# Altium footprint library WR-TBL_Pluggable Connector_3.81mm.PcbLib: 201 footprints (part 8 of 13)
Each footprint in its own frame and in the unit in brackets; x right, y up, seen from the top. Pads: shape width x height; smd on the part's side, far side on the other; paste and mask are expansions set on the pad; w line width, h text height; cw(c..) or ccw(c..) is an arc to the next point about the centre after c.
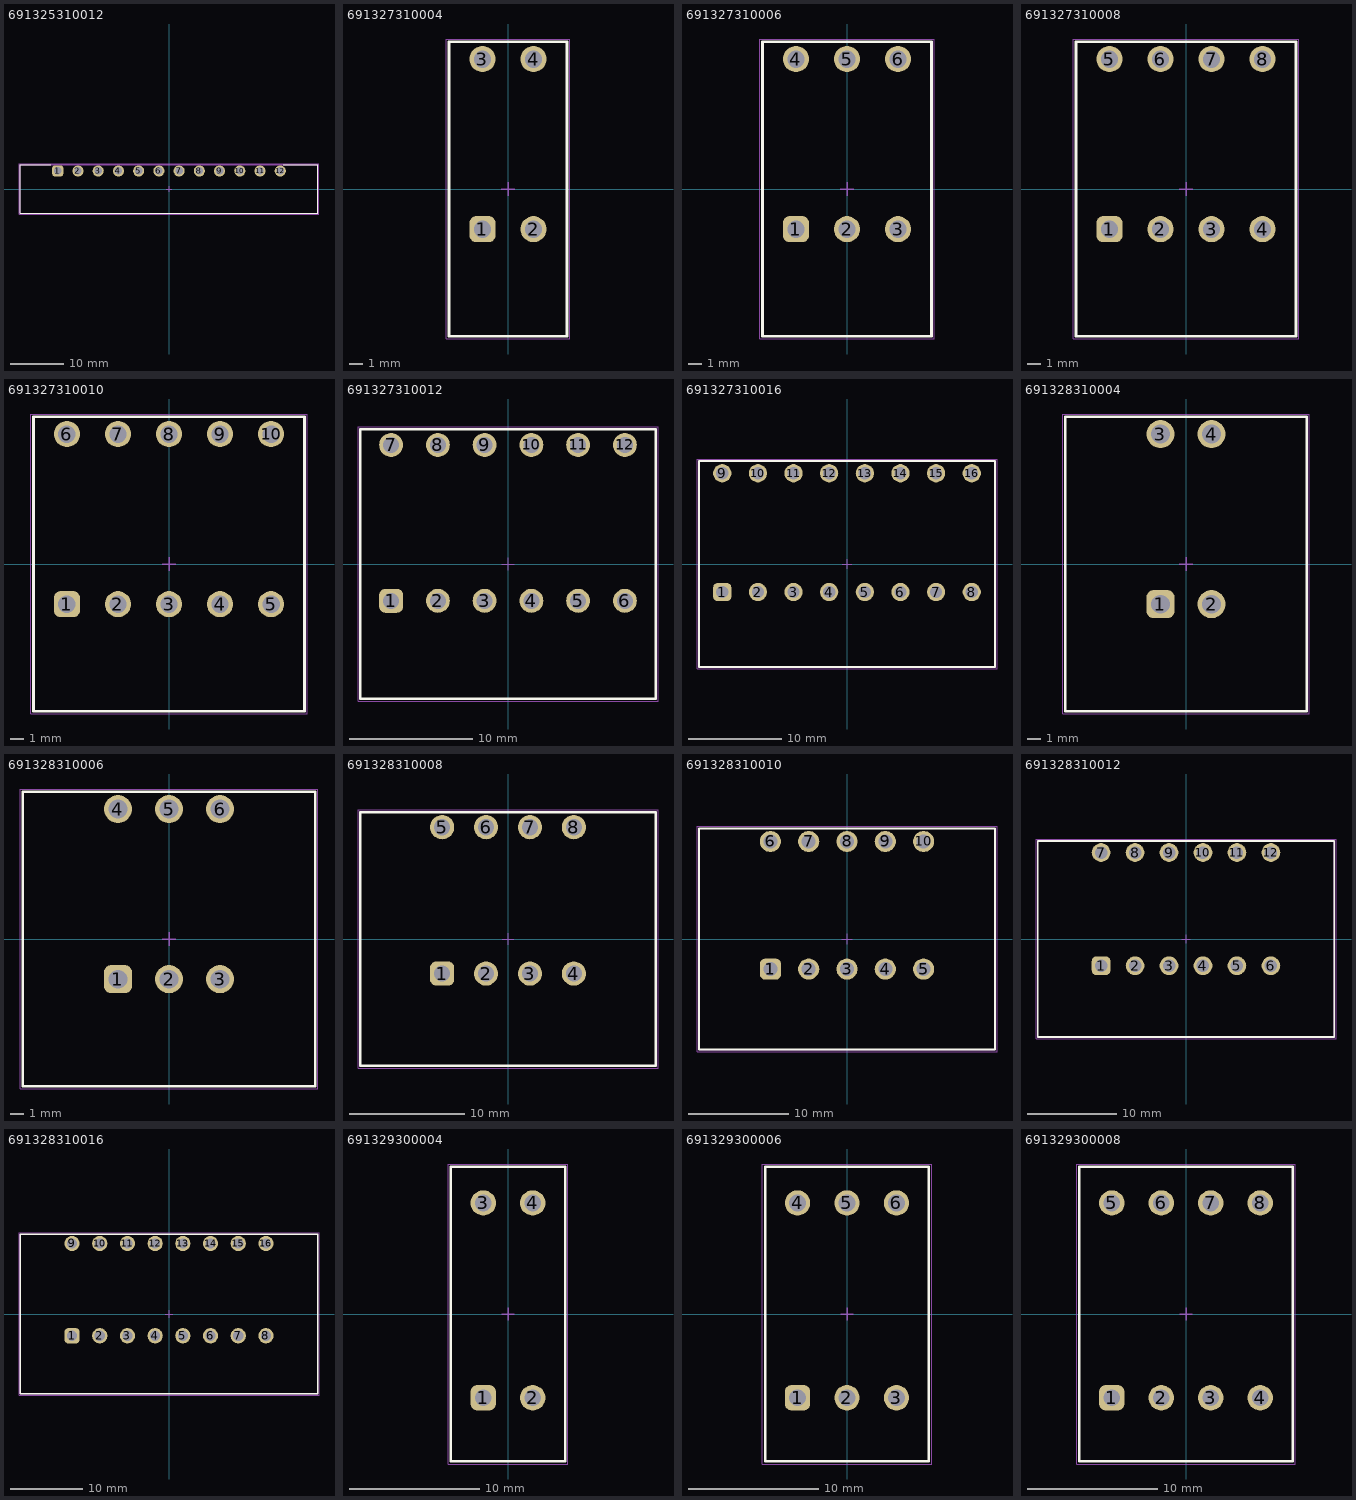
[diagram p7: the footprints below, top view; thin cyan lines are the x and y axes]

## 691325310012 [mm] "Horizontal PCB Header with Flanges, pitch 3.81mm, 12p"
height 7
pads (12):
  rrect50% 2.1x2.1 hole 1.4: 1(-20.955,3.4)
  round 2.1 hole 1.4: 2(-17.145,3.4) 3(-13.335,3.4) 4(-9.525,3.4) 5(-5.715,3.4) 6(-1.905,3.4) 7(1.905,3.4) 8(5.715,3.4) 9(9.525,3.4) 10(13.335,3.4) 11(17.145,3.4) 12(20.955,3.4)
Top Overlay:
  lines w0.2: -22.305,4.6 -28.055,4.6 -28.055,-4.6 28.055,-4.6 28.055,4.6 21.545,4.6
Top Assembly:
  lines w0.1: -28.055,-4.6 28.055,-4.6 28.055,4.6 -28.055,4.6 -28.055,-4.6
Top Designator:
  text ".Designator" at -3.647,-0.357 h1
Top 3D Body:
  lines w0.1: -28.055,-4.6 -28.055,4.6 28.055,4.6 28.055,-4.6 -28.055,-4.6
Top Courtyard:
  lines w0.05: -28.255,-4.8 -28.255,4.8 28.255,4.8 28.255,-4.8 -28.255,-4.8
Top Component Center:
  lines w0.1: -0.5,0 0.5,0 ; 0,-0.5 0,0.5
3D body "691325310012.stp": height 7.3, standoff -3.4, extent -28.055,-4.6 28.055,4.6

## 691327310004 [mm] "Dual Horizontal PCB Header, pitch 3.81mm, 04p"
height 22.7
pads (4):
  rrect50% 1.95x1.95 hole 1.3: 1(-1.905,-3)
  round 1.95 hole 1.3: 2(1.905,-3) 3(-1.905,9.7) 4(1.905,9.7)
Top Overlay:
  lines w0.2: -4.405,-11 -4.405,11 4.405,11 4.405,-11 -4.405,-11
Top Assembly:
  lines w0.1: -4.405,-11 4.405,-11 4.405,11 -4.405,11 -4.405,-11
Top Designator:
  text ".Designator" at -3.647,-0.357 h1
Top 3D Body:
  lines w0.1: -4.405,-11 -4.405,11 4.405,11 4.405,-11 -4.405,-11
Top Courtyard:
  lines w0.05: -4.605,-11.2 4.605,-11.2 4.605,11.2 -4.605,11.2 -4.605,-11.2
Top Component Center:
  lines w0.1: -0.5,0 0.5,0 ; 0,-0.5 0,0.5
3D body "691327310004.stp": height 22.85, standoff -3.35, extent -4.405,-11 4.405,11

## 691327310006 [mm] "Dual Horizontal PCB Header, pitch 3.81mm, 06p"
height 22.7
pads (6):
  rrect50% 1.95x1.95 hole 1.3: 1(-3.81,-3)
  round 1.95 hole 1.3: 2(0,-3) 3(3.81,-3) 4(-3.81,9.7) 5(0,9.7) 6(3.81,9.7)
Top Overlay:
  lines w0.2: -6.31,-11 -6.31,11 6.31,11 6.31,-11 -6.31,-11
Top Assembly:
  lines w0.1: -6.31,-11 6.31,-11 6.31,11 -6.31,11 -6.31,-11
Top Designator:
  text ".Designator" at -3.647,-0.357 h1
Top 3D Body:
  lines w0.1: -6.31,-11 -6.31,11 6.31,11 6.31,-11 -6.31,-11
Top Courtyard:
  lines w0.05: -6.51,-11.2 6.51,-11.2 6.51,11.2 -6.51,11.2 -6.51,-11.2
Top Component Center:
  lines w0.1: -0.5,0 0.5,0 ; 0,-0.5 0,0.5
3D body "691327310006.stp": height 22.85, standoff -3.35, extent -6.31,-11 6.31,11

## 691327310008 [mm] "Dual Horizontal PCB Header, pitch 3.81mm, 08p"
height 22.7
pads (8):
  rrect50% 1.95x1.95 hole 1.3: 1(-5.715,-3)
  round 1.95 hole 1.3: 2(-1.905,-3) 3(1.905,-3) 4(5.715,-3) 5(-5.715,9.7) 6(-1.905,9.7) 7(1.905,9.7) 8(5.715,9.7)
Top Overlay:
  lines w0.2: -8.215,-11 8.215,-11 8.215,11 -8.215,11 -8.215,-11
Top Assembly:
  lines w0.1: -8.215,-11 -8.215,11 8.215,11 8.215,-11 -8.215,-11
Top Designator:
  text ".Designator" at -3.647,-0.357 h1
Top 3D Body:
  lines w0.1: -8.215,-11 8.215,-11 8.215,11 -8.215,11 -8.215,-11
Top Courtyard:
  lines w0.05: -8.415,-11.2 -8.415,11.2 8.415,11.2 8.415,-11.2 -8.415,-11.2
Top Component Center:
  lines w0.1: -0.5,0 0.5,0 ; 0,-0.5 0,0.5
3D body "691327310008.stp": height 22.85, standoff -3.35, extent -8.215,-11 8.215,11

## 691327310010 [mm] "Dual Horizontal PCB Header, pitch 3.81mm, 10p"
height 22.7
pads (10):
  rrect50% 1.95x1.95 hole 1.3: 1(-7.62,-3)
  round 1.95 hole 1.3: 2(-3.81,-3) 3(0,-3) 4(3.81,-3) 5(7.62,-3) 6(-7.62,9.7) 7(-3.81,9.7) 8(0,9.7) 9(3.81,9.7) 10(7.62,9.7)
Top Overlay:
  lines w0.2: -10.12,-11 -10.12,11 10.12,11 10.12,-11 -10.12,-11
Top Assembly:
  lines w0.1: -10.12,-11 10.12,-11 10.12,11 -10.12,11 -10.12,-11
Top Designator:
  text ".Designator" at -3.647,-0.357 h1
Top 3D Body:
  lines w0.1: -10.12,-11 -10.12,11 10.12,11 10.12,-11 -10.12,-11
Top Courtyard:
  lines w0.05: -10.32,-11.2 10.32,-11.2 10.32,11.2 -10.32,11.2 -10.32,-11.2
Top Component Center:
  lines w0.1: -0.5,0 0.5,0 ; 0,-0.5 0,0.5
3D body "691327310010.stp": height 22.85, standoff -3.35, extent -10.12,-11 10.12,11

## 691327310012 [mm] "Dual Horizontal PCB Header, pitch 3.81mm, 12p"
height 22.7
pads (12):
  rrect50% 1.95x1.95 hole 1.3: 1(-9.525,-3)
  round 1.95 hole 1.3: 2(-5.715,-3) 3(-1.905,-3) 4(1.905,-3) 5(5.715,-3) 6(9.525,-3) 7(-9.525,9.7) 8(-5.715,9.7) 9(-1.905,9.7) 10(1.905,9.7) 11(5.715,9.7) 12(9.525,9.7)
Top Overlay:
  lines w0.2: -12.025,-11 -12.025,11 12.025,11 12.025,-11 -12.025,-11
Top Assembly:
  lines w0.1: -12.025,-11 12.025,-11 12.025,11 -12.025,11 -12.025,-11
Top Designator:
  text ".Designator" at -3.647,-0.357 h1
Top 3D Body:
  lines w0.1: -12.025,-11 -12.025,11 12.025,11 12.025,-11 -12.025,-11
Top Courtyard:
  lines w0.05: -12.225,-11.2 12.225,-11.2 12.225,11.2 -12.225,11.2 -12.225,-11.2
Top Component Center:
  lines w0.1: -0.5,0 0.5,0 ; 0,-0.5 0,0.5
3D body "691327310012.stp": height 22.85, standoff -3.35, extent -12.025,-11 12.025,11

## 691327310016 [mm] "Dual Horizontal PCB Header, pitch 3.81mm, 16p"
height 22.7
pads (16):
  rrect50% 1.95x1.95 hole 1.3: 1(-13.335,-3)
  round 1.95 hole 1.3: 2(-9.525,-3) 3(-5.715,-3) 4(-1.905,-3) 5(1.905,-3) 6(5.715,-3) 7(9.525,-3) 8(13.335,-3) 9(-13.335,9.7) 10(-9.525,9.7) 11(-5.715,9.7) 12(-1.905,9.7) 13(1.905,9.7) 14(5.715,9.7) 15(9.525,9.7) 16(13.335,9.7)
Top Overlay:
  lines w0.2: -15.835,-11 -15.835,11 15.835,11 15.835,-11 -15.835,-11
Top Assembly:
  lines w0.1: -15.835,-11 15.835,-11 15.835,11 -15.835,11 -15.835,-11
Top Designator:
  text ".Designator" at -3.647,-0.357 h1
Top 3D Body:
  lines w0.1: -15.835,-11 -15.835,11 15.835,11 15.835,-11 -15.835,-11
Top Courtyard:
  lines w0.05: -16.035,-11.2 16.035,-11.2 16.035,11.2 -16.035,11.2 -16.035,-11.2
Top Component Center:
  lines w0.1: -0.5,0 0.5,0 ; 0,-0.5 0,0.5
3D body "691327310016.stp": height 22.85, standoff -3.35, extent -15.835,-11 15.835,11

## 691328310004 [mm] "Double Level Horizontal Male PCB Header with Flanges & Nut Type, pitch 3.81mm, 04p"
height 22.7
pads (4):
  rrect50% 2.1x2.1 hole 1.4: 1(-1.905,-3)
  round 2.1 hole 1.4: 2(1.905,-3) 3(-1.905,9.7) 4(1.905,9.7)
Top Overlay:
  lines w0.2: -9.005,-11 -9.005,11 9.005,11 9.005,-11 -9.005,-11
Top Assembly:
  lines w0.1: -9.005,-11 9.005,-11 9.005,11 -9.005,11 -9.005,-11
Top Designator:
  text ".Designator" at -3.647,-0.357 h1
Top 3D Body:
  lines w0.1: -9.005,-11 -9.005,11 9.005,11 9.005,-11 -9.005,-11
Top Courtyard:
  lines w0.05: -9.205,-11.2 -9.205,11.2 9.205,11.2 9.205,-11.2 -9.205,-11.2
Top Component Center:
  lines w0.1: -0.5,0 0.5,0 ; 0,-0.5 0,0.5
3D body "691328310004.stp": height 22.85, standoff -3.35, extent -9.005,-11 9.005,11

## 691328310006 [mm] "Double Level Horizontal Male PCB Header with Flanges & Nut Type, pitch 3.81mm, 06p"
height 22.7
pads (6):
  rrect50% 2.1x2.1 hole 1.4: 1(-3.81,-3)
  round 2.1 hole 1.4: 2(0,-3) 3(3.81,-3) 4(-3.81,9.7) 5(0,9.7) 6(3.81,9.7)
Top Overlay:
  lines w0.2: -10.91,-11 -10.91,11 10.91,11 10.91,-11 -10.91,-11
Top Assembly:
  lines w0.1: -10.91,-11 10.91,-11 10.91,11 -10.91,11 -10.91,-11
Top Designator:
  text ".Designator" at -3.647,-0.357 h1
Top 3D Body:
  lines w0.1: -10.91,-11 -10.91,11 10.91,11 10.91,-11 -10.91,-11
Top Courtyard:
  lines w0.05: -11.11,-11.2 -11.11,11.2 11.11,11.2 11.11,-11.2 -11.11,-11.2
Top Component Center:
  lines w0.1: -0.5,0 0.5,0 ; 0,-0.5 0,0.5
3D body "691328310006.stp": height 22.85, standoff -3.35, extent -10.91,-11 10.91,11

## 691328310008 [mm] "Double Level Horizontal Male PCB Header with Flanges & Nut Type, pitch 3.81mm, 08p"
height 22.7
pads (8):
  rrect50% 2.1x2.1 hole 1.4: 1(-5.715,-3)
  round 2.1 hole 1.4: 2(-1.905,-3) 3(1.905,-3) 4(5.715,-3) 5(-5.715,9.7) 6(-1.905,9.7) 7(1.905,9.7) 8(5.715,9.7)
Top Overlay:
  lines w0.2: -12.815,-11 12.815,-11 12.815,11 -12.815,11 -12.815,-11
Top Assembly:
  lines w0.1: -12.815,-11 -12.815,11 12.815,11 12.815,-11 -12.815,-11
Top Designator:
  text ".Designator" at -3.647,-0.357 h1
Top 3D Body:
  lines w0.1: -12.815,-11 12.815,-11 12.815,11 -12.815,11 -12.815,-11
Top Courtyard:
  lines w0.05: -13.015,-11.2 13.015,-11.2 13.015,11.2 -13.015,11.2 -13.015,-11.2
Top Component Center:
  lines w0.1: -0.5,0 0.5,0 ; 0,-0.5 0,0.5
3D body "691328310008.stp": height 22.85, standoff -3.35, extent -12.815,-11 12.815,11

## 691328310010 [mm] "Double Level Horizontal Male PCB Header with Flanges & Nut Type, pitch 3.81mm, 10p"
height 22.7
pads (10):
  rrect50% 2.1x2.1 hole 1.4: 1(-7.62,-3)
  round 2.1 hole 1.4: 2(-3.81,-3) 3(0,-3) 4(3.81,-3) 5(7.62,-3) 6(-7.62,9.7) 7(-3.81,9.7) 8(0,9.7) 9(3.81,9.7) 10(7.62,9.7)
Top Overlay:
  lines w0.2: -14.72,-11 -14.72,11 14.72,11 14.72,-11 -14.72,-11
Top Assembly:
  lines w0.1: -14.72,-11 14.72,-11 14.72,11 -14.72,11 -14.72,-11
Top Designator:
  text ".Designator" at -3.647,-0.357 h1
Top 3D Body:
  lines w0.1: -14.72,-11 -14.72,11 14.72,11 14.72,-11 -14.72,-11
Top Courtyard:
  lines w0.05: -14.92,-11.2 -14.92,11.2 14.92,11.2 14.92,-11.2 -14.92,-11.2
Top Component Center:
  lines w0.1: -0.5,0 0.5,0 ; 0,-0.5 0,0.5
3D body "691328310010.stp": height 22.85, standoff -3.35, extent -14.72,-11 14.72,11

## 691328310012 [mm] "Double Level Horizontal Male PCB Header with Flanges & Nut Type, pitch 3.81mm, 12p"
height 22.7
pads (12):
  rrect50% 2.1x2.1 hole 1.4: 1(-9.525,-3)
  round 2.1 hole 1.4: 2(-5.715,-3) 3(-1.905,-3) 4(1.905,-3) 5(5.715,-3) 6(9.525,-3) 7(-9.525,9.7) 8(-5.715,9.7) 9(-1.905,9.7) 10(1.905,9.7) 11(5.715,9.7) 12(9.525,9.7)
Top Overlay:
  lines w0.2: -16.625,-11 -16.625,11 16.625,11 16.625,-11 -16.625,-11
Top Assembly:
  lines w0.1: -16.625,-11 16.625,-11 16.625,11 -16.625,11 -16.625,-11
Top Designator:
  text ".Designator" at -3.647,-0.357 h1
Top 3D Body:
  lines w0.1: -16.625,-11 -16.625,11 16.625,11 16.625,-11 -16.625,-11
Top Courtyard:
  lines w0.05: -16.825,-11.2 -16.825,11.2 16.825,11.2 16.825,-11.2 -16.825,-11.2
Top Component Center:
  lines w0.1: -0.5,0 0.5,0 ; 0,-0.5 0,0.5
3D body "691328310012.stp": height 22.85, standoff -3.35, extent -16.625,-11 16.625,11

## 691328310016 [mm] "Double Level Horizontal Male PCB Header with Flanges & Nut Type, pitch 3.81mm, 16p"
height 22.7
pads (16):
  rrect50% 2.1x2.1 hole 1.4: 1(-13.335,-3)
  round 2.1 hole 1.4: 2(-9.525,-3) 3(-5.715,-3) 4(-1.905,-3) 5(1.905,-3) 6(5.715,-3) 7(9.525,-3) 8(13.335,-3) 9(-13.335,9.7) 10(-9.525,9.7) 11(-5.715,9.7) 12(-1.905,9.7) 13(1.905,9.7) 14(5.715,9.7) 15(9.525,9.7) 16(13.335,9.7)
Top Overlay:
  lines w0.2: -20.435,-11 20.435,-11 20.435,11 -20.435,11 -20.435,-11
Top Assembly:
  lines w0.1: -20.435,-11 -20.435,11 20.435,11 20.435,-11 -20.435,-11
Top Designator:
  text ".Designator" at -3.647,-0.357 h1
Top 3D Body:
  lines w0.1: -20.435,-11 20.435,-11 20.435,11 -20.435,11 -20.435,-11
Top Courtyard:
  lines w0.05: -20.635,-11.2 20.635,-11.2 20.635,11.2 -20.635,11.2 -20.635,-11.2
Top Component Center:
  lines w0.1: -0.5,0 0.5,0 ; 0,-0.5 0,0.5
3D body "691328310016.stp": height 22.85, standoff -3.35, extent -20.435,-11 20.435,11

## 691329300004 [mm] "Double Level Vertical Male PCB Header, pitch 3.81mm, 04p"
height 22
pads (4):
  rrect50% 1.95x1.95 hole 1.3: 1(-1.905,-6.45)
  round 1.95 hole 1.3: 2(1.905,-6.45) 3(-1.905,8.55) 4(1.905,8.55)
Top Overlay:
  lines w0.2: -4.405,-11.35 -4.405,11.35 4.405,11.35 4.405,-11.35 -4.405,-11.35
Top Assembly:
  lines w0.1: -4.405,-11.35 4.405,-11.35 4.405,11.35 -4.405,11.35 -4.405,-11.35
Top Designator:
  text ".Designator" at -3.647,-0.357 h1
Top 3D Body:
  lines w0.1: -4.405,-11.35 -4.405,11.35 4.405,11.35 4.405,-11.35 -4.405,-11.35
Top Courtyard:
  lines w0.05: -4.605,-11.55 -4.605,11.55 4.605,11.55 4.605,-11.55 -4.605,-11.55
Top Component Center:
  lines w0.1: -0.5,0 0.5,0 ; 0,-0.5 0,0.5
3D body "691329300004.stp": height 22.1, standoff -3.4, extent -4.405,-11.35 4.405,11.35

## 691329300006 [mm] "Double Level Vertical Male PCB Header, pitch 3.81mm, 06p"
height 22
pads (6):
  rrect50% 1.95x1.95 hole 1.3: 1(-3.81,-6.45)
  round 1.95 hole 1.3: 2(0,-6.45) 3(3.81,-6.45) 4(-3.81,8.55) 5(0,8.55) 6(3.81,8.55)
Top Overlay:
  lines w0.2: -6.31,-11.35 6.31,-11.35 6.31,11.35 -6.31,11.35 -6.31,-11.35
Top Assembly:
  lines w0.1: -6.31,-11.35 -6.31,11.35 6.31,11.35 6.31,-11.35 -6.31,-11.35
Top Designator:
  text ".Designator" at -3.647,-0.357 h1
Top 3D Body:
  lines w0.1: -6.31,-11.35 6.31,-11.35 6.31,11.35 -6.31,11.35 -6.31,-11.35
Top Courtyard:
  lines w0.05: -6.51,-11.55 6.51,-11.55 6.51,11.55 -6.51,11.55 -6.51,-11.55
Top Component Center:
  lines w0.1: -0.5,0 0.5,0 ; 0,-0.5 0,0.5
3D body "691329300006.stp": height 22.1, standoff -3.4, extent -6.31,-11.35 6.31,11.35

## 691329300008 [mm] "Double Level Vertical Male PCB Header, pitch 3.81mm, 08p"
height 22
pads (8):
  rrect50% 1.95x1.95 hole 1.3: 1(-5.715,-6.45)
  round 1.95 hole 1.3: 2(-1.905,-6.45) 3(1.905,-6.45) 4(5.715,-6.45) 5(-5.715,8.55) 6(-1.905,8.55) 7(1.905,8.55) 8(5.715,8.55)
Top Overlay:
  lines w0.2: -8.215,-11.35 8.215,-11.35 8.215,11.35 -8.215,11.35 -8.215,-11.35
Top Assembly:
  lines w0.1: -8.215,-11.35 -8.215,11.35 8.215,11.35 8.215,-11.35 -8.215,-11.35
Top Designator:
  text ".Designator" at -3.647,-0.357 h1
Top 3D Body:
  lines w0.1: -8.215,-11.35 8.215,-11.35 8.215,11.35 -8.215,11.35 -8.215,-11.35
Top Courtyard:
  lines w0.05: -8.415,-11.55 8.415,-11.55 8.415,11.55 -8.415,11.55 -8.415,-11.55
Top Component Center:
  lines w0.1: -0.5,0 0.5,0 ; 0,-0.5 0,0.5
3D body "691329300008.stp": height 22.1, standoff -3.4, extent -8.215,-11.35 8.215,11.35